# Altium footprint library 10K resister 0805.PcbLib: 1 footprints
Each footprint in its own frame and in the unit in brackets; x right, y up, seen from the top. Pads: shape width x height; smd on the part's side, far side on the other; paste and mask are expansions set on the pad; w line width, h text height; cw(c..) or ccw(c..) is an arc to the next point about the centre after c.
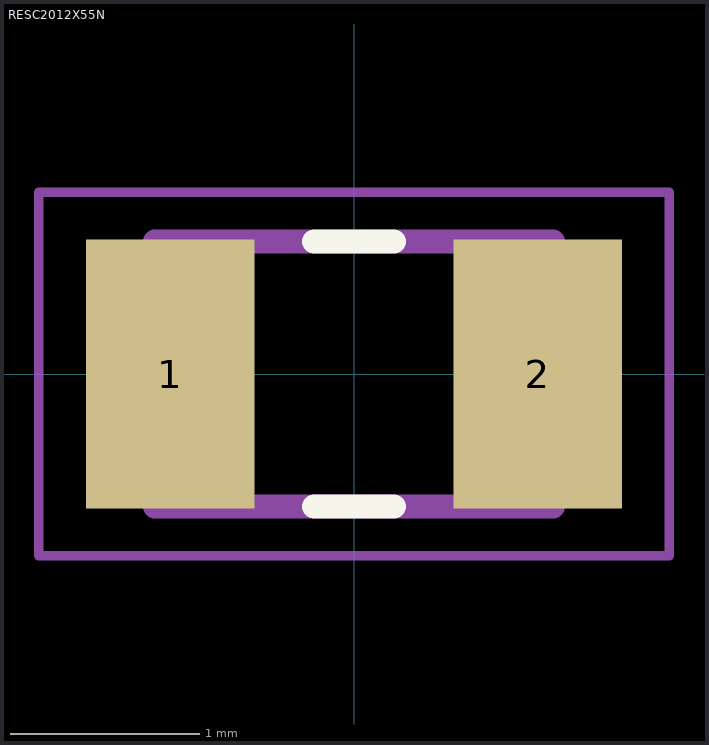
[diagram p0: the footprint, top view; thin cyan lines are the x and y axes]

## RESC2012X55N [mm]
pads (2):
  rect 0.89x1.42 smd: 1(-0.97,0) 2(0.97,0)
Top Overlay:
  lines w0.127: -0.21,-0.7 0.21,-0.7 ; -0.21,0.7 0.21,0.7
Assembly Top:
  lines w0.127: -1.05,-0.7 -1.05,0.7 1.05,0.7 1.05,-0.7 -1.05,-0.7
Courtyard Top:
  lines w0.05: -1.665,-0.96 -1.665,0.96 1.665,0.96 1.665,-0.96 -1.665,-0.96
3D body "step_temp.STEP": height 0.55, standoff 0, extent -1,-0.625 1,0.625